# Altium footprint library WR-TBL_Pluggable Connector_5.08mm.PcbLib: 295 footprints (part 9 of 19)
Each footprint in its own frame and in the unit in brackets; x right, y up, seen from the top. Pads: shape width x height; smd on the part's side, far side on the other; paste and mask are expansions set on the pad; w line width, h text height; cw(c..) or ccw(c..) is an arc to the next point about the centre after c.
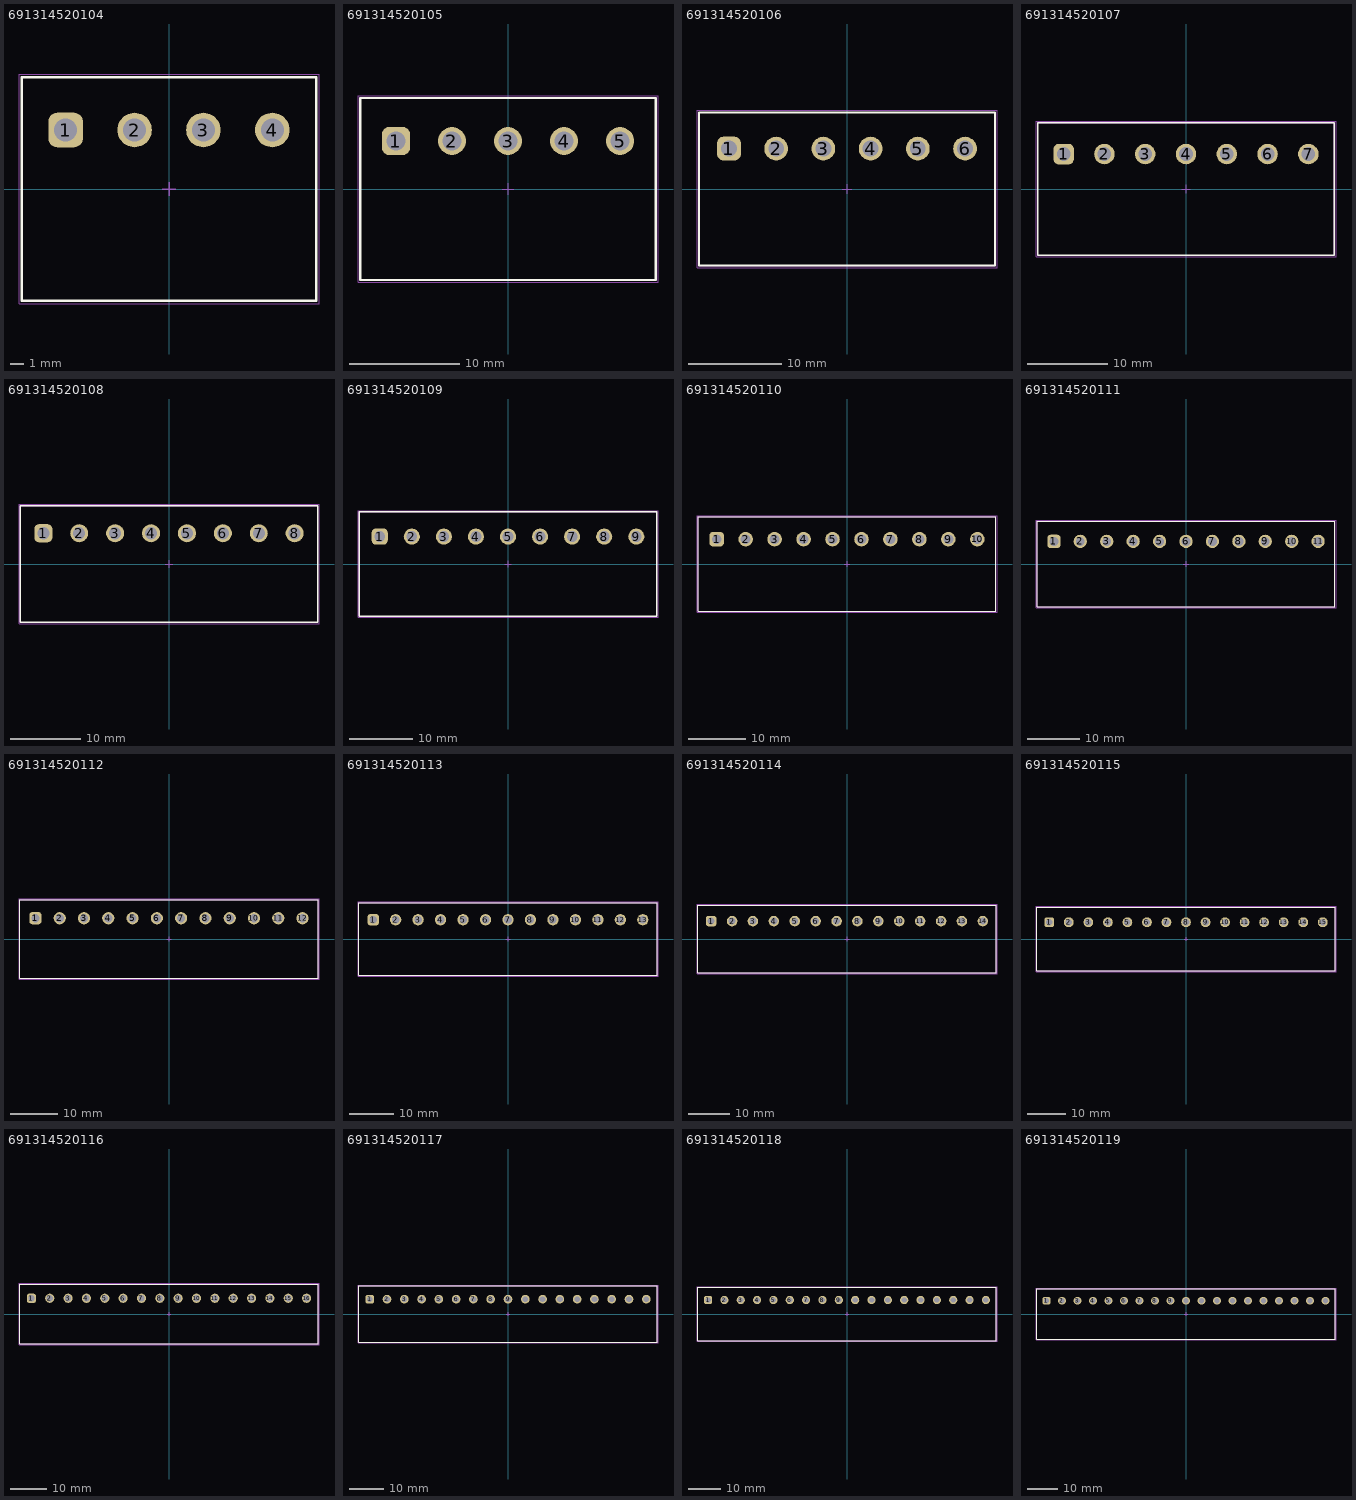
[diagram p8: the footprints below, top view; thin cyan lines are the x and y axes]

## 691314520104 [mm] "5,08mm - PCB Headers - 45¡ã- 04p"
height 14.5
pads (4):
  rrect50% 2.55x2.55 hole 1.7: 1(-7.62,4.35)
  round 2.55 hole 1.7: 2(-2.54,4.35) 3(2.54,4.35) 4(7.62,4.35)
Top Overlay:
  lines w0.2: -10.86,-8.25 10.86,-8.25 10.86,8.25 -10.86,8.25 -10.86,-8.25
Top Assembly:
  lines w0.1: -10.86,-8.25 -10.86,8.25 10.86,8.25 10.86,-8.25 -10.86,-8.25
Top Designator:
  text ".Designator" at -3.647,-0.357 h1
Top 3D Body:
  lines w0.1: -10.86,-8.25 10.86,-8.25 10.86,8.25 -10.86,8.25 -10.86,-8.25
Top Courtyard:
  lines w0.05: -11.06,-8.45 -11.06,8.45 11.06,8.45 11.06,-8.45 -11.06,-8.45
Top Component Center:
  lines w0.1: -0.5,0 0.5,0 ; 0,-0.5 0,0.5
3D body "691314520104.stp": height 14.55, standoff -4.05, extent -10.86,-8.25 10.86,8.25

## 691314520105 [mm] "5,08mm - PCB Headers - 45¡ã- 05p"
height 14.5
pads (5):
  rrect50% 2.55x2.55 hole 1.7: 1(-10.16,4.35)
  round 2.55 hole 1.7: 2(-5.08,4.35) 3(0,4.35) 4(5.08,4.35) 5(10.16,4.35)
Top Overlay:
  lines w0.2: -13.4,-8.25 13.4,-8.25 13.4,8.25 -13.4,8.25 -13.4,-8.25
Top Assembly:
  lines w0.1: -13.4,-8.25 -13.4,8.25 13.4,8.25 13.4,-8.25 -13.4,-8.25
Top Designator:
  text ".Designator" at -3.647,-0.357 h1
Top 3D Body:
  lines w0.1: -13.4,-8.25 13.4,-8.25 13.4,8.25 -13.4,8.25 -13.4,-8.25
Top Courtyard:
  lines w0.05: -13.6,-8.45 -13.6,8.45 13.6,8.45 13.6,-8.45 -13.6,-8.45
Top Component Center:
  lines w0.1: -0.5,0 0.5,0 ; 0,-0.5 0,0.5
3D body "691314520105.stp": height 14.55, standoff -4.05, extent -13.4,-8.25 13.4,8.25

## 691314520106 [mm] "5,08mm - PCB Headers - 45¡ã- 06p"
height 14.5
pads (6):
  rrect50% 2.55x2.55 hole 1.7: 1(-12.7,4.35)
  round 2.55 hole 1.7: 2(-7.62,4.35) 3(-2.54,4.35) 4(2.54,4.35) 5(7.62,4.35) 6(12.7,4.35)
Top Overlay:
  lines w0.2: -15.94,-8.25 -15.94,8.25 15.94,8.25 15.94,-8.25 -15.94,-8.25
Top Assembly:
  lines w0.1: -15.94,-8.25 15.94,-8.25 15.94,8.25 -15.94,8.25 -15.94,-8.25
Top Designator:
  text ".Designator" at -3.647,-0.357 h1
Top 3D Body:
  lines w0.1: -15.94,-8.25 -15.94,8.25 15.94,8.25 15.94,-8.25 -15.94,-8.25
Top Courtyard:
  lines w0.05: -16.14,-8.45 16.14,-8.45 16.14,8.45 -16.14,8.45 -16.14,-8.45
Top Component Center:
  lines w0.1: -0.5,0 0.5,0 ; 0,-0.5 0,0.5
3D body "691314520106.stp": height 14.55, standoff -4.05, extent -15.94,-8.25 15.94,8.25

## 691314520107 [mm] "5,08mm - PCB Headers - 45¡ã- 07p"
height 14.5
pads (7):
  rrect50% 2.55x2.55 hole 1.7: 1(-15.24,4.35)
  round 2.55 hole 1.7: 2(-10.16,4.35) 3(-5.08,4.35) 4(0,4.35) 5(5.08,4.35) 6(10.16,4.35) 7(15.24,4.35)
Top Overlay:
  lines w0.2: -18.48,-8.25 18.48,-8.25 18.48,8.25 -18.48,8.25 -18.48,-8.25
Top Assembly:
  lines w0.1: -18.48,-8.25 -18.48,8.25 18.48,8.25 18.48,-8.25 -18.48,-8.25
Top Designator:
  text ".Designator" at -3.647,-0.357 h1
Top 3D Body:
  lines w0.1: -18.48,-8.25 18.48,-8.25 18.48,8.25 -18.48,8.25 -18.48,-8.25
Top Courtyard:
  lines w0.05: -18.68,-8.45 -18.68,8.45 18.68,8.45 18.68,-8.45 -18.68,-8.45
Top Component Center:
  lines w0.1: -0.5,0 0.5,0 ; 0,-0.5 0,0.5
3D body "691314520107.stp": height 14.55, standoff -4.05, extent -18.48,-8.25 18.48,8.25

## 691314520108 [mm] "5,08mm - PCB Headers - 45¡ã- 08p"
height 14.5
pads (8):
  rrect50% 2.55x2.55 hole 1.7: 1(-17.78,4.35)
  round 2.55 hole 1.7: 2(-12.7,4.35) 3(-7.62,4.35) 4(-2.54,4.35) 5(2.54,4.35) 6(7.62,4.35) 7(12.7,4.35) 8(17.78,4.35)
Top Overlay:
  lines w0.2: -21.02,-8.25 -21.02,8.25 21.02,8.25 21.02,-8.25 -21.02,-8.25
Top Assembly:
  lines w0.1: -21.02,-8.25 21.02,-8.25 21.02,8.25 -21.02,8.25 -21.02,-8.25
Top Designator:
  text ".Designator" at -3.647,-0.357 h1
Top 3D Body:
  lines w0.1: -21.02,-8.25 -21.02,8.25 21.02,8.25 21.02,-8.25 -21.02,-8.25
Top Courtyard:
  lines w0.05: -21.22,-8.45 21.22,-8.45 21.22,8.45 -21.22,8.45 -21.22,-8.45
Top Component Center:
  lines w0.1: -0.5,0 0.5,0 ; 0,-0.5 0,0.5
3D body "691314520108.stp": height 14.55, standoff -4.05, extent -21.02,-8.25 21.02,8.25

## 691314520109 [mm] "5,08mm - PCB Headers - 45¡ã- 09p"
height 14.5
pads (9):
  rrect50% 2.55x2.55 hole 1.7: 1(-20.32,4.35)
  round 2.55 hole 1.7: 2(-15.24,4.35) 3(-10.16,4.35) 4(-5.08,4.35) 5(0,4.35) 6(5.08,4.35) 7(10.16,4.35) 8(15.24,4.35) 9(20.32,4.35)
Top Overlay:
  lines w0.2: -23.56,-8.25 -23.56,8.25 23.56,8.25 23.56,-8.25 -23.56,-8.25
Top Assembly:
  lines w0.1: -23.56,-8.25 23.56,-8.25 23.56,8.25 -23.56,8.25 -23.56,-8.25
Top Designator:
  text ".Designator" at -3.647,-0.357 h1
Top 3D Body:
  lines w0.1: -23.56,-8.25 -23.56,8.25 23.56,8.25 23.56,-8.25 -23.56,-8.25
Top Courtyard:
  lines w0.05: -23.76,-8.45 23.76,-8.45 23.76,8.45 -23.76,8.45 -23.76,-8.45
Top Component Center:
  lines w0.1: -0.5,0 0.5,0 ; 0,-0.5 0,0.5
3D body "691314520109.stp": height 14.55, standoff -4.05, extent -23.56,-8.25 23.56,8.25

## 691314520110 [mm] "5,08mm - PCB Headers - 45¡ã- 10p"
height 14.5
pads (10):
  rrect50% 2.55x2.55 hole 1.7: 1(-22.86,4.35)
  round 2.55 hole 1.7: 2(-17.78,4.35) 3(-12.7,4.35) 4(-7.62,4.35) 5(-2.54,4.35) 6(2.54,4.35) 7(7.62,4.35) 8(12.7,4.35) 9(17.78,4.35) 10(22.86,4.35)
Top Overlay:
  lines w0.2: -26.1,-8.25 26.1,-8.25 26.1,8.25 -26.1,8.25 -26.1,-8.25
Top Assembly:
  lines w0.1: -26.1,-8.25 -26.1,8.25 26.1,8.25 26.1,-8.25 -26.1,-8.25
Top Designator:
  text ".Designator" at -3.647,-0.357 h1
Top 3D Body:
  lines w0.1: -26.1,-8.25 26.1,-8.25 26.1,8.25 -26.1,8.25 -26.1,-8.25
Top Courtyard:
  lines w0.05: -26.3,-8.45 -26.3,8.45 26.3,8.45 26.3,-8.45 -26.3,-8.45
Top Component Center:
  lines w0.1: -0.5,0 0.5,0 ; 0,-0.5 0,0.5
3D body "691314520110.stp": height 14.55, standoff -4.05, extent -26.1,-8.25 26.1,8.25

## 691314520111 [mm] "5,08mm - PCB Headers - 45¡ã- 11p"
height 14.5
pads (11):
  rrect50% 2.55x2.55 hole 1.7: 1(-25.4,4.35)
  round 2.55 hole 1.7: 2(-20.32,4.35) 3(-15.24,4.35) 4(-10.16,4.35) 5(-5.08,4.35) 6(0,4.35) 7(5.08,4.35) 8(10.16,4.35) 9(15.24,4.35) 10(20.32,4.35) 11(25.4,4.35)
Top Overlay:
  lines w0.2: -28.64,-8.25 -28.64,8.25 28.64,8.25 28.64,-8.25 -28.64,-8.25
Top Assembly:
  lines w0.1: -28.64,-8.25 28.64,-8.25 28.64,8.25 -28.64,8.25 -28.64,-8.25
Top Designator:
  text ".Designator" at -3.647,-0.357 h1
Top 3D Body:
  lines w0.1: -28.64,-8.25 -28.64,8.25 28.64,8.25 28.64,-8.25 -28.64,-8.25
Top Courtyard:
  lines w0.05: -28.84,-8.45 28.84,-8.45 28.84,8.45 -28.84,8.45 -28.84,-8.45
Top Component Center:
  lines w0.1: -0.5,0 0.5,0 ; 0,-0.5 0,0.5
3D body "691314520111.stp": height 14.55, standoff -4.05, extent -28.64,-8.25 28.64,8.25

## 691314520112 [mm] "5,08mm - PCB Headers - 45¡ã- 12p"
height 14.5
pads (12):
  rrect50% 2.55x2.55 hole 1.7: 1(-27.94,4.35)
  round 2.55 hole 1.7: 2(-22.86,4.35) 3(-17.78,4.35) 4(-12.7,4.35) 5(-7.62,4.35) 6(-2.54,4.35) 7(2.54,4.35) 8(7.62,4.35) 9(12.7,4.35) 10(17.78,4.35) 11(22.86,4.35) 12(27.94,4.35)
Top Overlay:
  lines w0.2: -31.18,-8.25 31.18,-8.25 31.18,8.25 -31.18,8.25 -31.18,-8.25
Top Assembly:
  lines w0.1: -31.18,-8.25 -31.18,8.25 31.18,8.25 31.18,-8.25 -31.18,-8.25
Top Designator:
  text ".Designator" at -3.647,-0.357 h1
Top 3D Body:
  lines w0.1: -31.18,-8.25 31.18,-8.25 31.18,8.25 -31.18,8.25 -31.18,-8.25
Top Courtyard:
  lines w0.05: -31.38,-8.45 -31.38,8.45 31.38,8.45 31.38,-8.45 -31.38,-8.45
Top Component Center:
  lines w0.1: -0.5,0 0.5,0 ; 0,-0.5 0,0.5
3D body "691314520112.stp": height 14.55, standoff -4.05, extent -31.18,-8.25 31.18,8.25

## 691314520113 [mm] "5,08mm - PCB Headers - 45¡ã- 13p"
height 14.5
pads (13):
  rrect50% 2.55x2.55 hole 1.7: 1(-30.48,4.35)
  round 2.55 hole 1.7: 2(-25.4,4.35) 3(-20.32,4.35) 4(-15.24,4.35) 5(-10.16,4.35) 6(-5.08,4.35) 7(0,4.35) 8(5.08,4.35) 9(10.16,4.35) 10(15.24,4.35) 11(20.32,4.35) 12(25.4,4.35) 13(30.48,4.35)
Top Overlay:
  lines w0.2: -33.72,-8.25 -33.72,8.25 33.72,8.25 33.72,-8.25 -33.72,-8.25
Top Assembly:
  lines w0.1: -33.72,-8.25 33.72,-8.25 33.72,8.25 -33.72,8.25 -33.72,-8.25
Top Designator:
  text ".Designator" at -3.647,-0.357 h1
Top 3D Body:
  lines w0.1: -33.72,-8.25 -33.72,8.25 33.72,8.25 33.72,-8.25 -33.72,-8.25
Top Courtyard:
  lines w0.05: -33.92,-8.45 33.92,-8.45 33.92,8.45 -33.92,8.45 -33.92,-8.45
Top Component Center:
  lines w0.1: -0.5,0 0.5,0 ; 0,-0.5 0,0.5
3D body "691314520113.stp": height 14.55, standoff -4.05, extent -33.72,-8.25 33.72,8.25

## 691314520114 [mm] "5,08mm - PCB Headers - 45¡ã- 14p"
height 14.5
pads (14):
  rrect50% 2.55x2.55 hole 1.7: 1(-33.02,4.35)
  round 2.55 hole 1.7: 2(-27.94,4.35) 3(-22.86,4.35) 4(-17.78,4.35) 5(-12.7,4.35) 6(-7.62,4.35) 7(-2.54,4.35) 8(2.54,4.35) 9(7.62,4.35) 10(12.7,4.35) 11(17.78,4.35) 12(22.86,4.35) 13(27.94,4.35) 14(33.02,4.35)
Top Overlay:
  lines w0.2: -36.26,-8.25 36.26,-8.25 36.26,8.25 -36.26,8.25 -36.26,-8.25
Top Assembly:
  lines w0.1: -36.26,-8.25 -36.26,8.25 36.26,8.25 36.26,-8.25 -36.26,-8.25
Top Designator:
  text ".Designator" at -3.647,-0.357 h1
Top 3D Body:
  lines w0.1: -36.26,-8.25 36.26,-8.25 36.26,8.25 -36.26,8.25 -36.26,-8.25
Top Courtyard:
  lines w0.05: -36.46,-8.45 -36.46,8.45 36.46,8.45 36.46,-8.45 -36.46,-8.45
Top Component Center:
  lines w0.1: -0.5,0 0.5,0 ; 0,-0.5 0,0.5
3D body "691314520114.stp": height 14.55, standoff -4.05, extent -36.26,-8.25 36.26,8.25

## 691314520115 [mm] "5,08mm - PCB Headers - 45¡ã- 15p"
height 14.5
pads (15):
  rrect50% 2.55x2.55 hole 1.7: 1(-35.56,4.35)
  round 2.55 hole 1.7: 2(-30.48,4.35) 3(-25.4,4.35) 4(-20.32,4.35) 5(-15.24,4.35) 6(-10.16,4.35) 7(-5.08,4.35) 8(0,4.35) 9(5.08,4.35) 10(10.16,4.35) 11(15.24,4.35) 12(20.32,4.35) 13(25.4,4.35) 14(30.48,4.35) 15(35.56,4.35)
Top Overlay:
  lines w0.2: -38.8,-8.25 -38.8,8.25 38.8,8.25 38.8,-8.25 -38.8,-8.25
Top Assembly:
  lines w0.1: -38.8,-8.25 38.8,-8.25 38.8,8.25 -38.8,8.25 -38.8,-8.25
Top Designator:
  text ".Designator" at -3.647,-0.357 h1
Top 3D Body:
  lines w0.1: -38.8,-8.25 -38.8,8.25 38.8,8.25 38.8,-8.25 -38.8,-8.25
Top Courtyard:
  lines w0.05: -39,-8.45 39,-8.45 39,8.45 -39,8.45 -39,-8.45
Top Component Center:
  lines w0.1: -0.5,0 0.5,0 ; 0,-0.5 0,0.5
3D body "691314520115.stp": height 14.55, standoff -4.05, extent -38.8,-8.25 38.8,8.25

## 691314520116 [mm] "5,08mm - PCB Headers - 45¡ã- 16p"
height 14.5
pads (16):
  rrect50% 2.55x2.55 hole 1.7: 1(-38.1,4.35)
  round 2.55 hole 1.7: 2(-33.02,4.35) 3(-27.94,4.35) 4(-22.86,4.35) 5(-17.78,4.35) 6(-12.7,4.35) 7(-7.62,4.35) 8(-2.54,4.35) 9(2.54,4.35) 10(7.62,4.35) 11(12.7,4.35) 12(17.78,4.35) 13(22.86,4.35) 14(27.94,4.35) 15(33.02,4.35) 16(38.1,4.35)
Top Overlay:
  lines w0.2: -41.34,-8.25 -41.34,8.25 41.34,8.25 41.34,-8.25 -41.34,-8.25
Top Assembly:
  lines w0.1: -41.34,-8.25 41.34,-8.25 41.34,8.25 -41.34,8.25 -41.34,-8.25
Top Designator:
  text ".Designator" at -3.647,-0.357 h1
Top 3D Body:
  lines w0.1: -41.34,-8.25 -41.34,8.25 41.34,8.25 41.34,-8.25 -41.34,-8.25
Top Courtyard:
  lines w0.05: -41.54,-8.45 41.54,-8.45 41.54,8.45 -41.54,8.45 -41.54,-8.45
Top Component Center:
  lines w0.1: -0.5,0 0.5,0 ; 0,-0.5 0,0.5
3D body "691314520116.stp": height 14.55, standoff -4.05, extent -41.34,-8.25 41.34,8.25

## 691314520117 [mm] "5,08mm - PCB Headers - 45¡ã- 17p"
height 14.5
pads (17):
  rrect50% 2.55x2.55 hole 1.7: 1(-40.64,4.35)
  round 2.55 hole 1.7: 2(-35.56,4.35) 3(-30.48,4.35) 4(-25.4,4.35) 5(-20.32,4.35) 6(-15.24,4.35) 7(-10.16,4.35) 8(-5.08,4.35) 9(0,4.35) 10(5.08,4.35) 11(10.16,4.35) 12(15.24,4.35) 13(20.32,4.35) 14(25.4,4.35) 15(30.48,4.35) 16(35.56,4.35) 17(40.64,4.35)
Top Overlay:
  lines w0.2: -43.88,-8.25 43.88,-8.25 43.88,8.25 -43.88,8.25 -43.88,-8.25
Top Assembly:
  lines w0.1: -43.88,-8.25 -43.88,8.25 43.88,8.25 43.88,-8.25 -43.88,-8.25
Top Designator:
  text ".Designator" at -3.647,-0.357 h1
Top 3D Body:
  lines w0.1: -43.88,-8.25 43.88,-8.25 43.88,8.25 -43.88,8.25 -43.88,-8.25
Top Courtyard:
  lines w0.05: -44.08,-8.45 -44.08,8.45 44.08,8.45 44.08,-8.45 -44.08,-8.45
Top Component Center:
  lines w0.1: -0.5,0 0.5,0 ; 0,-0.5 0,0.5
3D body "691314520117.stp": height 14.55, standoff -4.05, extent -43.88,-8.25 43.88,8.25

## 691314520118 [mm] "5,08mm - PCB Headers - 45¡ã- 18p"
height 14.5
pads (18):
  rrect50% 2.55x2.55 hole 1.7: 1(-43.18,4.35)
  round 2.55 hole 1.7: 2(-38.1,4.35) 3(-33.02,4.35) 4(-27.94,4.35) 5(-22.86,4.35) 6(-17.78,4.35) 7(-12.7,4.35) 8(-7.62,4.35) 9(-2.54,4.35) 10(2.54,4.35) 11(7.62,4.35) 12(12.7,4.35) 13(17.78,4.35) 14(22.86,4.35) 15(27.94,4.35) 16(33.02,4.35) 17(38.1,4.35) 18(43.18,4.35)
Top Overlay:
  lines w0.2: -46.42,-8.25 46.42,-8.25 46.42,8.25 -46.42,8.25 -46.42,-8.25
Top Assembly:
  lines w0.1: -46.42,-8.25 -46.42,8.25 46.42,8.25 46.42,-8.25 -46.42,-8.25
Top Designator:
  text ".Designator" at -3.647,-0.357 h1
Top 3D Body:
  lines w0.1: -46.42,-8.25 46.42,-8.25 46.42,8.25 -46.42,8.25 -46.42,-8.25
Top Courtyard:
  lines w0.05: -46.62,-8.45 -46.62,8.45 46.62,8.45 46.62,-8.45 -46.62,-8.45
Top Component Center:
  lines w0.1: -0.5,0 0.5,0 ; 0,-0.5 0,0.5
3D body "691314520118.stp": height 14.55, standoff -4.05, extent -46.42,-8.25 46.42,8.25

## 691314520119 [mm] "5,08mm - PCB Headers - 45¡ã- 19p"
height 14.5
pads (19):
  rrect50% 2.55x2.55 hole 1.7: 1(-45.72,4.35)
  round 2.55 hole 1.7: 2(-40.64,4.35) 3(-35.56,4.35) 4(-30.48,4.35) 5(-25.4,4.35) 6(-20.32,4.35) 7(-15.24,4.35) 8(-10.16,4.35) 9(-5.08,4.35) 10(0,4.35) 11(5.08,4.35) 12(10.16,4.35) 13(15.24,4.35) 14(20.32,4.35) 15(25.4,4.35) 16(30.48,4.35) 17(35.56,4.35) 18(40.64,4.35) 19(45.72,4.35)
Top Overlay:
  lines w0.2: -48.96,-8.25 48.96,-8.25 48.96,8.25 -48.96,8.25 -48.96,-8.25
Top Assembly:
  lines w0.1: -48.96,-8.25 -48.96,8.25 48.96,8.25 48.96,-8.25 -48.96,-8.25
Top Designator:
  text ".Designator" at -3.647,-0.357 h1
Top 3D Body:
  lines w0.1: -48.96,-8.25 48.96,-8.25 48.96,8.25 -48.96,8.25 -48.96,-8.25
Top Courtyard:
  lines w0.05: -49.16,-8.45 -49.16,8.45 49.16,8.45 49.16,-8.45 -49.16,-8.45
Top Component Center:
  lines w0.1: -0.5,0 0.5,0 ; 0,-0.5 0,0.5
3D body "691314520119.stp": height 14.55, standoff -4.05, extent -48.96,-8.25 48.96,8.25